# Altium footprint library WR-TBL_Pluggable Connector_5.08mm.PcbLib: 295 footprints (part 18 of 19)
Each footprint in its own frame and in the unit in brackets; x right, y up, seen from the top. Pads: shape width x height; smd on the part's side, far side on the other; paste and mask are expansions set on the pad; w line width, h text height; cw(c..) or ccw(c..) is an arc to the next point about the centre after c.
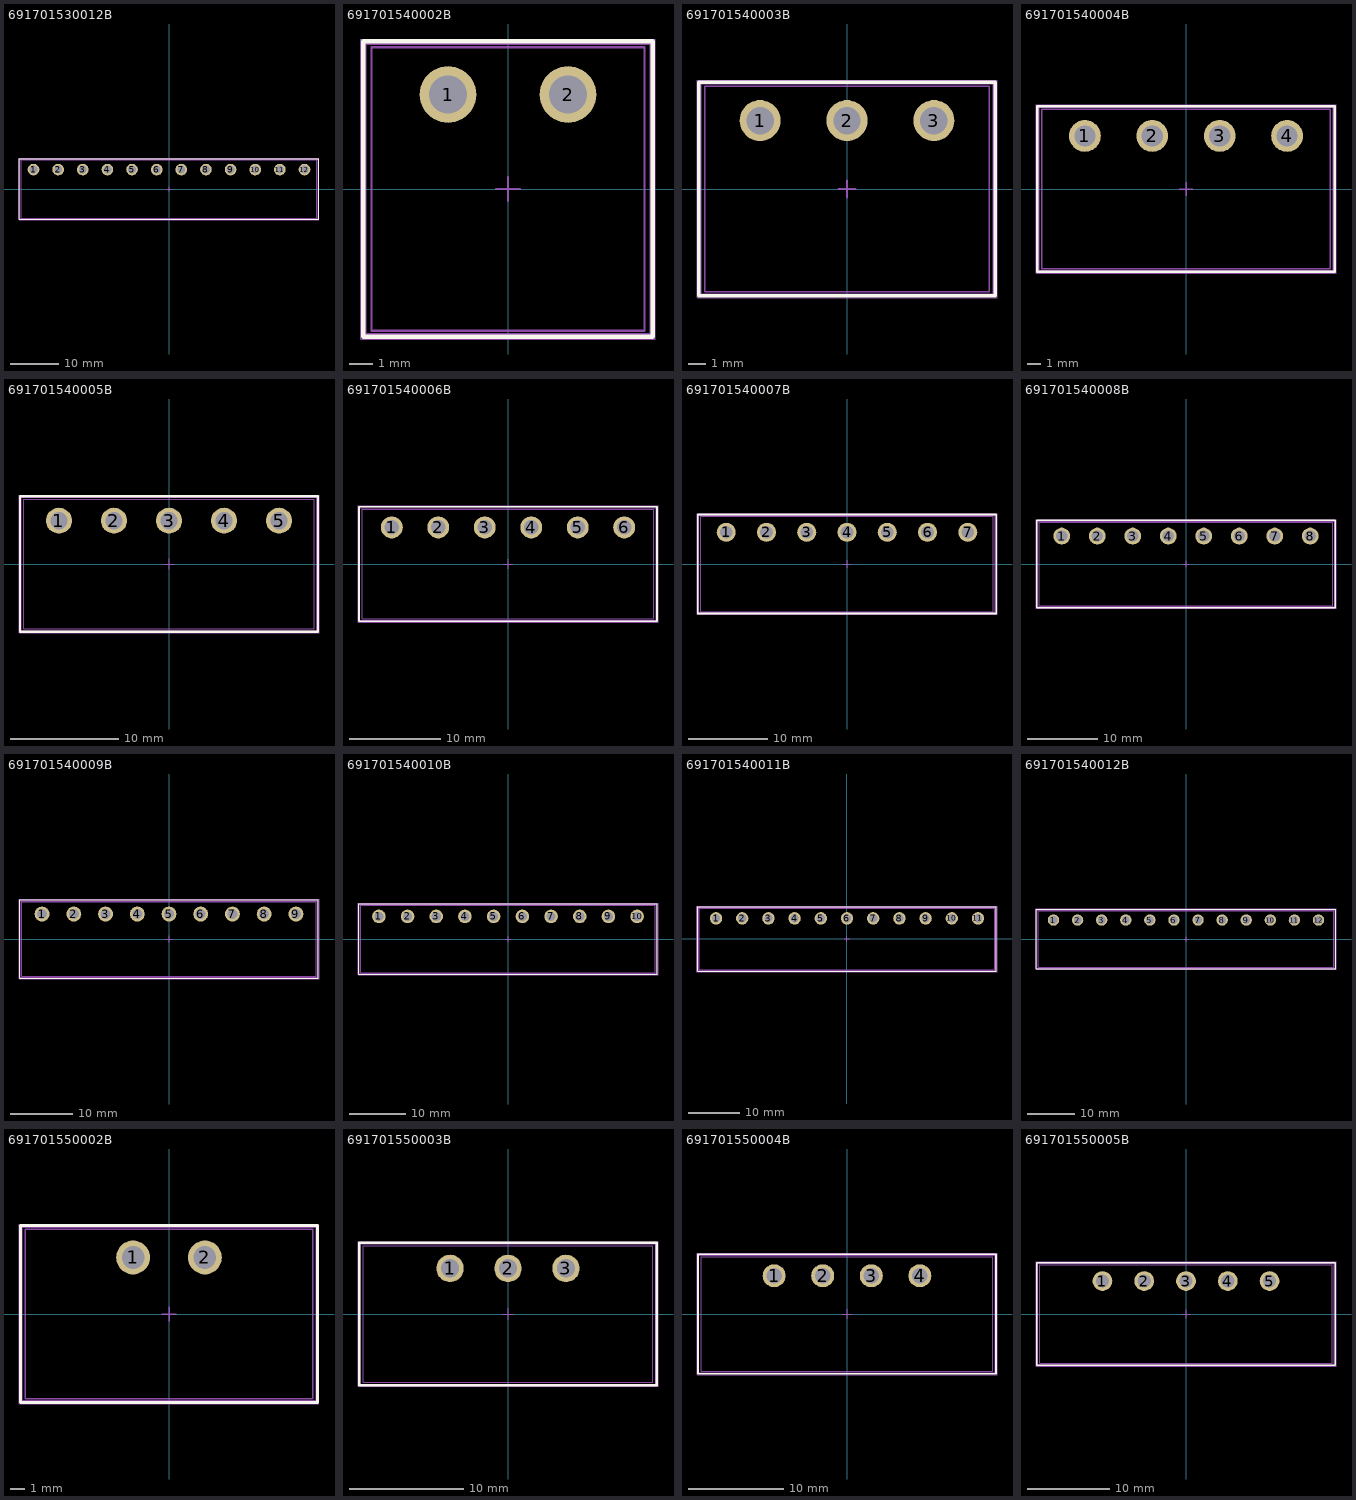
[diagram p17: the footprints below, top view; thin cyan lines are the x and y axes]

## 691701530012B [mm] "THR - 5,08mm - PCB Horizontal Open - 12p"
height 8.4
pads (12):
  round 2.4 hole 1.6: 1(-27.94,4) 2(-22.86,4) 3(-17.78,4) 4(-12.7,4) 5(-7.62,4) 6(-2.54,4) 7(2.54,4) 8(7.62,4) 9(12.7,4) 10(17.78,4) 11(22.86,4) 12(27.94,4)
Top Overlay:
  lines w0.2: -30.83,-6.25 -30.83,6.25 30.83,6.25 30.83,-6.25 -30.83,-6.25
Top Paste:
  region: 25.94,5.85 29.94,5.85 29.94,2.15 25.94,2.15
  region: 20.86,5.85 24.86,5.85 24.86,2.15 20.86,2.15
  region: 15.78,5.85 19.78,5.85 19.78,2.15 15.78,2.15
  region: 10.7,5.85 14.7,5.85 14.7,2.15 10.7,2.15
  region: 5.62,5.85 9.62,5.85 9.62,2.15 5.62,2.15
  region: 0.54,5.85 4.54,5.85 4.54,2.15 0.54,2.15
  region: -9.62,5.85 -5.62,5.85 -5.62,2.15 -9.62,2.15
  region: -19.78,5.85 -15.78,5.85 -15.78,2.15 -19.78,2.15
  region: -24.86,5.85 -20.86,5.85 -20.86,2.15 -24.86,2.15
  region: -29.94,5.85 -25.94,5.85 -25.94,2.15 -29.94,2.15
  region: -14.7,5.85 -10.7,5.85 -10.7,2.15 -14.7,2.15
  region: -4.54,5.85 -0.54,5.85 -0.54,2.15 -4.54,2.15
Assembly Notes:
  text "Stencil thickness : 120 μm" at -5.156,-7.001 h1
Top Assembly:
  lines w0.1: -30.73,-6.15 30.73,-6.15 30.73,6.15 -30.73,6.15 -30.73,-6.15
Top Designator:
  text ".Designator" at -3.647,-0.357 h1
Top 3D Body:
  lines w0.1: -30.48,-6 -30.48,6 30.48,6 30.48,-6 -30.48,-6
Top Courtyard:
  lines w0.05: -30.93,-6.35 30.93,-6.35 30.93,6.35 -30.93,6.35 -30.93,-6.35
Top Component Center:
  lines w0.1: -0.5,0 0.5,0 ; 0,-0.5 0,0.5
3D body "691701530012B.stp": height 8.6, standoff -2.5, extent -30.48,-6 30.48,6

## 691701540002B [mm] "THR - 5,08mm - PCB Horizontal Close - 02p"
height 8.5
pads (2):
  round 2.4 hole 1.6: 1(-2.54,4) 2(2.54,4)
Top Overlay:
  lines w0.2: -6.13,-6.25 6.13,-6.25 6.13,6.25 -6.13,6.25 -6.13,-6.25
Top Paste:
  region: 0.54,5.85 4.54,5.85 4.54,2.15 0.54,2.15
  region: -4.54,5.85 -0.54,5.85 -0.54,2.15 -4.54,2.15
Assembly Notes:
  text "Stencil thickness : 120 μm" at -5.156,-7.051 h1
Top Assembly:
  lines w0.1: -6.03,-6.15 -6.03,6.15 6.03,6.15 6.03,-6.15 -6.03,-6.15
Top Designator:
  text ".Designator" at -3.647,-0.357 h1
Top 3D Body:
  lines w0.1: -5.78,-6 -5.78,6 5.78,6 5.78,-6 -5.78,-6
Top Courtyard:
  lines w0.05: -6.23,-6.35 -6.23,6.35 6.23,6.35 6.23,-6.35 -6.23,-6.35
Top Component Center:
  lines w0.1: -0.5,0 0.5,0 ; 0,-0.5 0,0.5
3D body "691701540002B.stp": height 8.6, standoff -2.5, extent -5.78,-6 5.78,6

## 691701540003B [mm] "THR - 5,08mm - PCB Horizontal Close - 03p"
height 8.5
pads (3):
  round 2.4 hole 1.6: 1(-5.08,4) 2(0,4) 3(5.08,4)
Top Overlay:
  lines w0.2: -8.67,-6.25 8.67,-6.25 8.67,6.25 -8.67,6.25 -8.67,-6.25
Top Paste:
  region: -2,5.85 2,5.85 2,2.15 -2,2.15
  region: -7.08,5.85 -3.08,5.85 -3.08,2.15 -7.08,2.15
  region: 3.08,5.85 7.08,5.85 7.08,2.15 3.08,2.15
Assembly Notes:
  text "Stencil thickness : 120 μm" at -5.156,-7.051 h1
Top Assembly:
  lines w0.1: -8.57,-6.15 -8.57,6.15 8.57,6.15 8.57,-6.15 -8.57,-6.15
Top Designator:
  text ".Designator" at -3.647,-0.357 h1
Top 3D Body:
  lines w0.1: -8.32,-6 -8.32,6 8.32,6 8.32,-6 -8.32,-6
Top Courtyard:
  lines w0.05: -8.77,-6.35 -8.77,6.35 8.77,6.35 8.77,-6.35 -8.77,-6.35
Top Component Center:
  lines w0.1: -0.5,0 0.5,0 ; 0,-0.5 0,0.5
3D body "691701540003B.stp": height 8.6, standoff -2.5, extent -8.32,-6 8.32,6

## 691701540004B [mm] "THR - 5,08mm - PCB Horizontal Close - 04p"
height 8.5
pads (4):
  round 2.4 hole 1.6: 1(-7.62,4) 2(-2.54,4) 3(2.54,4) 4(7.62,4)
Top Overlay:
  lines w0.2: -11.21,-6.25 11.21,-6.25 11.21,6.25 -11.21,6.25 -11.21,-6.25
Top Paste:
  region: -4.54,5.85 -0.54,5.85 -0.54,2.15 -4.54,2.15
  region: -9.62,5.85 -5.62,5.85 -5.62,2.15 -9.62,2.15
  region: 0.54,5.85 4.54,5.85 4.54,2.15 0.54,2.15
  region: 5.62,5.85 9.62,5.85 9.62,2.15 5.62,2.15
Assembly Notes:
  text "Stencil thickness : 120 μm" at -5.156,-7.051 h1
Top Assembly:
  lines w0.1: -11.11,-6.15 -11.11,6.15 11.11,6.15 11.11,-6.15 -11.11,-6.15
Top Designator:
  text ".Designator" at -3.647,-0.357 h1
Top 3D Body:
  lines w0.1: -10.86,-6 -10.86,6 10.86,6 10.86,-6 -10.86,-6
Top Courtyard:
  lines w0.05: -11.31,-6.35 -11.31,6.35 11.31,6.35 11.31,-6.35 -11.31,-6.35
Top Component Center:
  lines w0.1: -0.5,0 0.5,0 ; 0,-0.5 0,0.5
3D body "691701540004B.stp": height 8.6, standoff -2.5, extent -10.86,-6 10.86,6

## 691701540005B [mm] "THR - 5,08mm - PCB Horizontal Close - 05p"
height 8.5
pads (5):
  round 2.4 hole 1.6: 1(-10.16,4) 2(-5.08,4) 3(0,4) 4(5.08,4) 5(10.16,4)
Top Overlay:
  lines w0.2: -13.75,-6.25 13.75,-6.25 13.75,6.25 -13.75,6.25 -13.75,-6.25
Top Paste:
  region: 8.16,5.85 12.16,5.85 12.16,2.15 8.16,2.15
  region: 3.08,5.85 7.08,5.85 7.08,2.15 3.08,2.15
  region: -2,5.85 2,5.85 2,2.15 -2,2.15
  region: -12.16,5.85 -8.16,5.85 -8.16,2.15 -12.16,2.15
  region: -7.08,5.85 -3.08,5.85 -3.08,2.15 -7.08,2.15
Assembly Notes:
  text "Stencil thickness : 120 μm" at -5.156,-7.051 h1
Top Assembly:
  lines w0.1: -13.65,-6.15 -13.65,6.15 13.65,6.15 13.65,-6.15 -13.65,-6.15
Top Designator:
  text ".Designator" at -3.647,-0.357 h1
Top 3D Body:
  lines w0.1: -13.4,-6 -13.4,6 13.4,6 13.4,-6 -13.4,-6
Top Courtyard:
  lines w0.05: -13.85,-6.35 -13.85,6.35 13.85,6.35 13.85,-6.35 -13.85,-6.35
Top Component Center:
  lines w0.1: -0.5,0 0.5,0 ; 0,-0.5 0,0.5
3D body "691701540005B.stp": height 8.6, standoff -2.5, extent -13.4,-6 13.4,6

## 691701540006B [mm] "THR - 5,08mm - PCB Horizontal Close - 06p"
height 8.5
pads (6):
  round 2.4 hole 1.6: 1(-12.7,4) 2(-7.62,4) 3(-2.54,4) 4(2.54,4) 5(7.62,4) 6(12.7,4)
Top Overlay:
  lines w0.2: -16.29,-6.25 16.29,-6.25 16.29,6.25 -16.29,6.25 -16.29,-6.25
Top Paste:
  region: 10.7,5.85 14.7,5.85 14.7,2.15 10.7,2.15
  region: 5.62,5.85 9.62,5.85 9.62,2.15 5.62,2.15
  region: 0.54,5.85 4.54,5.85 4.54,2.15 0.54,2.15
  region: -4.54,5.85 -0.54,5.85 -0.54,2.15 -4.54,2.15
  region: -14.7,5.85 -10.7,5.85 -10.7,2.15 -14.7,2.15
  region: -9.62,5.85 -5.62,5.85 -5.62,2.15 -9.62,2.15
Assembly Notes:
  text "Stencil thickness : 120 μm" at -5.156,-7.051 h1
Top Assembly:
  lines w0.1: -16.19,-6.15 -16.19,6.15 16.19,6.15 16.19,-6.15 -16.19,-6.15
Top Designator:
  text ".Designator" at -3.647,-0.357 h1
Top 3D Body:
  lines w0.1: -15.94,-6 -15.94,6 15.94,6 15.94,-6 -15.94,-6
Top Courtyard:
  lines w0.05: -16.39,-6.35 -16.39,6.35 16.39,6.35 16.39,-6.35 -16.39,-6.35
Top Component Center:
  lines w0.1: -0.5,0 0.5,0 ; 0,-0.5 0,0.5
3D body "691701540006B.stp": height 8.6, standoff -2.5, extent -15.94,-6 15.94,6

## 691701540007B [mm] "THR - 5,08mm - PCB Horizontal Close - 07p"
height 8.5
pads (7):
  round 2.4 hole 1.6: 1(-15.24,4) 2(-10.16,4) 3(-5.08,4) 4(0,4) 5(5.08,4) 6(10.16,4) 7(15.24,4)
Top Overlay:
  lines w0.2: -18.83,-6.25 18.83,-6.25 18.83,6.25 -18.83,6.25 -18.83,-6.25
Top Paste:
  region: 13.24,5.85 17.24,5.85 17.24,2.15 13.24,2.15
  region: 8.16,5.85 12.16,5.85 12.16,2.15 8.16,2.15
  region: 3.08,5.85 7.08,5.85 7.08,2.15 3.08,2.15
  region: -2,5.85 2,5.85 2,2.15 -2,2.15
  region: -7.08,5.85 -3.08,5.85 -3.08,2.15 -7.08,2.15
  region: -17.24,5.85 -13.24,5.85 -13.24,2.15 -17.24,2.15
  region: -12.16,5.85 -8.16,5.85 -8.16,2.15 -12.16,2.15
Assembly Notes:
  text "Stencil thickness : 120 μm" at -5.156,-7.051 h1
Top Assembly:
  lines w0.1: -18.73,-6.15 -18.73,6.15 18.73,6.15 18.73,-6.15 -18.73,-6.15
Top Designator:
  text ".Designator" at -3.647,-0.357 h1
Top 3D Body:
  lines w0.1: -18.48,-6 -18.48,6 18.48,6 18.48,-6 -18.48,-6
Top Courtyard:
  lines w0.05: -18.93,-6.35 -18.93,6.35 18.93,6.35 18.93,-6.35 -18.93,-6.35
Top Component Center:
  lines w0.1: -0.5,0 0.5,0 ; 0,-0.5 0,0.5
3D body "691701540007B.stp": height 8.6, standoff -2.5, extent -18.48,-6 18.48,6

## 691701540008B [mm] "THR - 5,08mm - PCB Horizontal Close - 08p"
height 8.5
pads (8):
  round 2.4 hole 1.6: 1(-17.78,4) 2(-12.7,4) 3(-7.62,4) 4(-2.54,4) 5(2.54,4) 6(7.62,4) 7(12.7,4) 8(17.78,4)
Top Overlay:
  lines w0.2: -21.37,-6.25 21.37,-6.25 21.37,6.25 -21.37,6.25 -21.37,-6.25
Top Paste:
  region: -14.7,5.85 -10.7,5.85 -10.7,2.15 -14.7,2.15
  region: -19.78,5.85 -15.78,5.85 -15.78,2.15 -19.78,2.15
  region: -9.62,5.85 -5.62,5.85 -5.62,2.15 -9.62,2.15
  region: -4.54,5.85 -0.54,5.85 -0.54,2.15 -4.54,2.15
  region: 0.54,5.85 4.54,5.85 4.54,2.15 0.54,2.15
  region: 5.62,5.85 9.62,5.85 9.62,2.15 5.62,2.15
  region: 10.7,5.85 14.7,5.85 14.7,2.15 10.7,2.15
  region: 15.78,5.85 19.78,5.85 19.78,2.15 15.78,2.15
Assembly Notes:
  text "Stencil thickness : 120 μm" at -5.156,-7.051 h1
Top Assembly:
  lines w0.1: -21.27,-6.15 -21.27,6.15 21.27,6.15 21.27,-6.15 -21.27,-6.15
Top Designator:
  text ".Designator" at -3.647,-0.357 h1
Top 3D Body:
  lines w0.1: -21.02,-6 -21.02,6 21.02,6 21.02,-6 -21.02,-6
Top Courtyard:
  lines w0.05: -21.47,-6.35 -21.47,6.35 21.47,6.35 21.47,-6.35 -21.47,-6.35
Top Component Center:
  lines w0.1: -0.5,0 0.5,0 ; 0,-0.5 0,0.5
3D body "691701540008B.stp": height 8.6, standoff -2.5, extent -21.02,-6 21.02,6

## 691701540009B [mm] "THR - 5,08mm - PCB Horizontal Close - 09p"
height 8.5
pads (9):
  round 2.4 hole 1.6: 1(-20.32,4) 2(-15.24,4) 3(-10.16,4) 4(-5.08,4) 5(0,4) 6(5.08,4) 7(10.16,4) 8(15.24,4) 9(20.32,4)
Top Overlay:
  lines w0.2: -23.91,-6.25 23.91,-6.25 23.91,6.25 -23.91,6.25 -23.91,-6.25
Top Paste:
  region: 18.32,5.85 22.32,5.85 22.32,2.15 18.32,2.15
  region: 13.24,5.85 17.24,5.85 17.24,2.15 13.24,2.15
  region: 8.16,5.85 12.16,5.85 12.16,2.15 8.16,2.15
  region: 3.08,5.85 7.08,5.85 7.08,2.15 3.08,2.15
  region: -2,5.85 2,5.85 2,2.15 -2,2.15
  region: -7.08,5.85 -3.08,5.85 -3.08,2.15 -7.08,2.15
  region: -12.16,5.85 -8.16,5.85 -8.16,2.15 -12.16,2.15
  region: -22.32,5.85 -18.32,5.85 -18.32,2.15 -22.32,2.15
  region: -17.24,5.85 -13.24,5.85 -13.24,2.15 -17.24,2.15
Assembly Notes:
  text "Stencil thickness : 120 μm" at -5.156,-7.051 h1
Top Assembly:
  lines w0.1: -23.81,-6.15 -23.81,6.15 23.81,6.15 23.81,-6.15 -23.81,-6.15
Top Designator:
  text ".Designator" at -3.647,-0.357 h1
Top 3D Body:
  lines w0.1: -23.56,-6 -23.56,6 23.56,6 23.56,-6 -23.56,-6
Top Courtyard:
  lines w0.05: -24.01,-6.35 -24.01,6.35 24.01,6.35 24.01,-6.35 -24.01,-6.35
Top Component Center:
  lines w0.1: -0.5,0 0.5,0 ; 0,-0.5 0,0.5
3D body "691701540009B.stp": height 8.6, standoff -2.5, extent -23.56,-6 23.56,6

## 691701540010B [mm] "THR - 5,08mm - PCB Horizontal Close - 10p"
height 8.5
pads (10):
  round 2.4 hole 1.6: 1(-22.86,4) 2(-17.78,4) 3(-12.7,4) 4(-7.62,4) 5(-2.54,4) 6(2.54,4) 7(7.62,4) 8(12.7,4) 9(17.78,4) 10(22.86,4)
Top Overlay:
  lines w0.2: -26.45,-6.25 26.45,-6.25 26.45,6.25 -26.45,6.25 -26.45,-6.25
Top Paste:
  region: -19.78,5.85 -15.78,5.85 -15.78,2.15 -19.78,2.15
  region: -24.86,5.85 -20.86,5.85 -20.86,2.15 -24.86,2.15
  region: -14.7,5.85 -10.7,5.85 -10.7,2.15 -14.7,2.15
  region: -9.62,5.85 -5.62,5.85 -5.62,2.15 -9.62,2.15
  region: -4.54,5.85 -0.54,5.85 -0.54,2.15 -4.54,2.15
  region: 0.54,5.85 4.54,5.85 4.54,2.15 0.54,2.15
  region: 5.62,5.85 9.62,5.85 9.62,2.15 5.62,2.15
  region: 10.7,5.85 14.7,5.85 14.7,2.15 10.7,2.15
  region: 15.78,5.85 19.78,5.85 19.78,2.15 15.78,2.15
  region: 20.86,5.85 24.86,5.85 24.86,2.15 20.86,2.15
Assembly Notes:
  text "Stencil thickness : 120 μm" at -5.156,-7.051 h1
Top Assembly:
  lines w0.1: -26.35,-6.15 -26.35,6.15 26.35,6.15 26.35,-6.15 -26.35,-6.15
Top Designator:
  text ".Designator" at -3.647,-0.357 h1
Top 3D Body:
  lines w0.1: -26.1,-6 -26.1,6 26.1,6 26.1,-6 -26.1,-6
Top Courtyard:
  lines w0.05: -26.55,-6.35 -26.55,6.35 26.55,6.35 26.55,-6.35 -26.55,-6.35
Top Component Center:
  lines w0.1: -0.5,0 0.5,0 ; 0,-0.5 0,0.5
3D body "691701540010B.stp": height 8.6, standoff -2.5, extent -26.1,-6 26.1,6

## 691701540011B [mm] "THR - 5,08mm - PCB Horizontal Close - 11p"
height 8.5
pads (11):
  round 2.4 hole 1.6: 1(-25.4,4) 2(-20.32,4) 3(-15.24,4) 4(-10.16,4) 5(-5.08,4) 6(0,4) 7(5.08,4) 8(10.16,4) 9(15.24,4) 10(20.32,4) 11(25.4,4)
Top Overlay:
  lines w0.2: -28.99,-6.25 28.99,-6.25 28.99,6.25 -28.99,6.25 -28.99,-6.25
Top Paste:
  region: -22.32,5.85 -18.32,5.85 -18.32,2.15 -22.32,2.15
  region: -27.4,5.85 -23.4,5.85 -23.4,2.15 -27.4,2.15
  region: -17.24,5.85 -13.24,5.85 -13.24,2.15 -17.24,2.15
  region: -12.16,5.85 -8.16,5.85 -8.16,2.15 -12.16,2.15
  region: -7.08,5.85 -3.08,5.85 -3.08,2.15 -7.08,2.15
  region: -2,5.85 2,5.85 2,2.15 -2,2.15
  region: 3.08,5.85 7.08,5.85 7.08,2.15 3.08,2.15
  region: 8.16,5.85 12.16,5.85 12.16,2.15 8.16,2.15
  region: 13.24,5.85 17.24,5.85 17.24,2.15 13.24,2.15
  region: 18.32,5.85 22.32,5.85 22.32,2.15 18.32,2.15
  region: 23.4,5.85 27.4,5.85 27.4,2.15 23.4,2.15
Assembly Notes:
  text "Stencil thickness : 120 μm" at -5.156,-7.051 h1
Top Assembly:
  lines w0.1: -28.89,-6.15 -28.89,6.15 28.89,6.15 28.89,-6.15 -28.89,-6.15
Top Designator:
  text ".Designator" at -3.647,-0.357 h1
Top 3D Body:
  lines w0.1: -28.64,-6 -28.64,6 28.64,6 28.64,-6 -28.64,-6
Top Courtyard:
  lines w0.05: -29.09,-6.35 -29.09,6.35 29.09,6.35 29.09,-6.35 -29.09,-6.35
Top Component Center:
  lines w0.1: -0.5,0 0.5,0 ; 0,-0.5 0,0.5
3D body "691701540011B.stp": height 8.6, standoff -2.5, extent -28.64,-6 28.64,6

## 691701540012B [mm] "THR - 5,08mm - PCB Horizontal Close - 12p"
height 8.5
pads (12):
  round 2.4 hole 1.6: 1(-27.94,4) 2(-22.86,4) 3(-17.78,4) 4(-12.7,4) 5(-7.62,4) 6(-2.54,4) 7(2.54,4) 8(7.62,4) 9(12.7,4) 10(17.78,4) 11(22.86,4) 12(27.94,4)
Top Overlay:
  lines w0.2: -31.53,-6.25 31.53,-6.25 31.53,6.25 -31.53,6.25 -31.53,-6.25
Top Paste:
  region: 25.94,5.85 29.94,5.85 29.94,2.15 25.94,2.15
  region: 20.86,5.85 24.86,5.85 24.86,2.15 20.86,2.15
  region: 15.78,5.85 19.78,5.85 19.78,2.15 15.78,2.15
  region: 10.7,5.85 14.7,5.85 14.7,2.15 10.7,2.15
  region: 5.62,5.85 9.62,5.85 9.62,2.15 5.62,2.15
  region: 0.54,5.85 4.54,5.85 4.54,2.15 0.54,2.15
  region: -4.54,5.85 -0.54,5.85 -0.54,2.15 -4.54,2.15
  region: -9.62,5.85 -5.62,5.85 -5.62,2.15 -9.62,2.15
  region: -14.7,5.85 -10.7,5.85 -10.7,2.15 -14.7,2.15
  region: -19.78,5.85 -15.78,5.85 -15.78,2.15 -19.78,2.15
  region: -29.94,5.85 -25.94,5.85 -25.94,2.15 -29.94,2.15
  region: -24.86,5.85 -20.86,5.85 -20.86,2.15 -24.86,2.15
Assembly Notes:
  text "Stencil thickness : 120 μm" at -5.156,-7.051 h1
Top Assembly:
  lines w0.1: -31.43,-6.15 -31.43,6.15 31.43,6.15 31.43,-6.15 -31.43,-6.15
Top Designator:
  text ".Designator" at -3.647,-0.357 h1
Top 3D Body:
  lines w0.1: -31.18,-6 -31.18,6 31.18,6 31.18,-6 -31.18,-6
Top Courtyard:
  lines w0.05: -31.63,-6.35 -31.63,6.35 31.63,6.35 31.63,-6.35 -31.63,-6.35
Top Component Center:
  lines w0.1: -0.5,0 0.5,0 ; 0,-0.5 0,0.5
3D body "691701540012B.stp": height 8.6, standoff -2.5, extent -31.18,-6 31.18,6

## 691701550002B [mm] "THR - 5,08mm - PCB Horizontal Flange - 02p"
height 8.4
pads (2):
  round 2.4 hole 1.6: 1(-2.54,4) 2(2.54,4)
Top Overlay:
  lines w0.2: -10.51,-6.25 10.51,-6.25 10.51,6.25 -10.51,6.25 -10.51,-6.25
Top Paste:
  region: 0.54,5.85 4.54,5.85 4.54,2.15 0.54,2.15
  region: -4.54,5.85 -0.54,5.85 -0.54,2.15 -4.54,2.15
Assembly Notes:
  text "Stencil thickness : 120 μm" at -5.156,-7.051 h1
Top Assembly:
  lines w0.1: -10.41,-6.15 -10.41,6.15 10.41,6.15 10.41,-6.15 -10.41,-6.15
Top Designator:
  text ".Designator" at -3.647,-0.357 h1
Top 3D Body:
  lines w0.1: -10.16,-6 10.16,-6 10.16,6 -10.16,6 -10.16,-6
Top Courtyard:
  lines w0.05: -10.61,-6.35 10.61,-6.35 10.61,6.35 -10.61,6.35 -10.61,-6.35
Top Component Center:
  lines w0.1: -0.5,0 0.5,0 ; 0,-0.5 0,0.5
3D body "691701550002B.stp": height 8.55, standoff -2.55, extent -10.16,-6.01 10.16,6

## 691701550003B [mm] "THR - 5,08mm - PCB Horizontal Flange - 03p"
height 8.4
pads (3):
  round 2.4 hole 1.6: 1(-5.08,4) 2(0,4) 3(5.08,4)
Top Overlay:
  lines w0.2: -13.05,-6.25 13.05,-6.25 13.05,6.25 -13.05,6.25 -13.05,-6.25
Top Paste:
  region: 3.08,5.85 7.08,5.85 7.08,2.15 3.08,2.15
  region: -2,5.85 2,5.85 2,2.15 -2,2.15
  region: -7.08,5.85 -3.08,5.85 -3.08,2.15 -7.08,2.15
Assembly Notes:
  text "Stencil thickness : 120 μm" at -5.156,-7.051 h1
Top Assembly:
  lines w0.1: -12.95,-6.15 -12.95,6.15 12.95,6.15 12.95,-6.15 -12.95,-6.15
Top Designator:
  text ".Designator" at -3.647,-0.357 h1
Top 3D Body:
  lines w0.1: -12.7,-6 12.7,-6 12.7,6 -12.7,6 -12.7,-6
Top Courtyard:
  lines w0.05: -13.15,-6.35 13.15,-6.35 13.15,6.35 -13.15,6.35 -13.15,-6.35
Top Component Center:
  lines w0.1: -0.5,0 0.5,0 ; 0,-0.5 0,0.5
3D body "691701550003B.stp": height 8.55, standoff -2.55, extent -12.7,-6.01 12.7,6

## 691701550004B [mm] "THR - 5,08mm - PCB Horizontal Flange - 04p"
height 8.4
pads (4):
  round 2.4 hole 1.6: 1(-7.62,4) 2(-2.54,4) 3(2.54,4) 4(7.62,4)
Top Overlay:
  lines w0.2: -15.59,-6.25 15.59,-6.25 15.59,6.25 -15.59,6.25 -15.59,-6.25
Top Paste:
  region: 5.62,5.85 9.62,5.85 9.62,2.15 5.62,2.15
  region: 0.54,5.85 4.54,5.85 4.54,2.15 0.54,2.15
  region: -4.54,5.85 -0.54,5.85 -0.54,2.15 -4.54,2.15
  region: -9.62,5.85 -5.62,5.85 -5.62,2.15 -9.62,2.15
Assembly Notes:
  text "Stencil thickness : 120 μm" at -5.156,-7.051 h1
Top Assembly:
  lines w0.1: -15.49,-6.15 -15.49,6.15 15.49,6.15 15.49,-6.15 -15.49,-6.15
Top Designator:
  text ".Designator" at -3.647,-0.357 h1
Top 3D Body:
  lines w0.1: -15.24,-6 15.24,-6 15.24,6 -15.24,6 -15.24,-6
Top Courtyard:
  lines w0.05: -15.69,-6.35 15.69,-6.35 15.69,6.35 -15.69,6.35 -15.69,-6.35
Top Component Center:
  lines w0.1: -0.5,0 0.5,0 ; 0,-0.5 0,0.5
3D body "691701550004B.stp": height 8.55, standoff -2.55, extent -15.24,-6 15.24,6.01

## 691701550005B [mm] "THR - 5,08mm - PCB Horizontal Flange - 05p"
height 8.4
pads (5):
  round 2.4 hole 1.6: 1(-10.16,4) 2(-5.08,4) 3(0,4) 4(5.08,4) 5(10.16,4)
Top Overlay:
  lines w0.2: -18.13,-6.25 -18.13,6.25 18.13,6.25 18.13,-6.25 -18.13,-6.25
Top Paste:
  region: -12.16,5.85 -8.16,5.85 -8.16,2.15 -12.16,2.15
  region: -7.08,5.85 -3.08,5.85 -3.08,2.15 -7.08,2.15
  region: -2,5.85 2,5.85 2,2.15 -2,2.15
  region: 3.08,5.85 7.08,5.85 7.08,2.15 3.08,2.15
  region: 8.16,5.85 12.16,5.85 12.16,2.15 8.16,2.15
Assembly Notes:
  text "Stencil thickness : 120 μm" at -5.156,-7.051 h1
Top Assembly:
  lines w0.1: -18.03,-6.15 18.03,-6.15 18.03,6.15 -18.03,6.15 -18.03,-6.15
Top Designator:
  text ".Designator" at -3.647,-0.357 h1
Top 3D Body:
  lines w0.1: -17.78,-6 -17.78,6 17.78,6 17.78,-6 -17.78,-6
Top Courtyard:
  lines w0.05: -18.23,-6.35 -18.23,6.35 18.23,6.35 18.23,-6.35 -18.23,-6.35
Top Component Center:
  lines w0.1: -0.5,0 0.5,0 ; 0,-0.5 0,0.5
3D body "691701550005B.stp": height 8.55, standoff -2.55, extent -17.78,-6 17.78,6.01